# Altium footprint library MTS-103.PcbLib: 1 footprints
Each footprint in its own frame and in the unit in brackets; x right, y up, seen from the top. Pads: shape width x height; smd on the part's side, far side on the other; paste and mask are expansions set on the pad; w line width, h text height; cw(c..) or ccw(c..) is an arc to the next point about the centre after c.
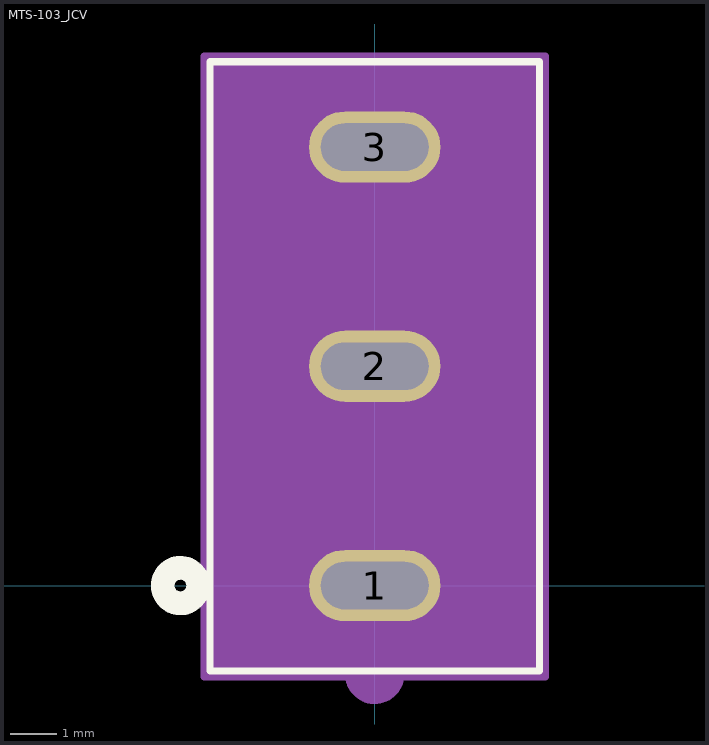
[diagram p0: the footprint, top view; thin cyan lines are the x and y axes]

## MTS-103_JCV [mil]
pads (3):
  oval 111x60 hole 40 slot 91 at 0 deg paste+0 mask+0: 1(0,0) 2(0,185.04) 3(0,370.08)
Top Overlay:
  circle w20: c-164,0 r15
  lines w6: -139,-71.96 139,-71.96 139,442.04 -139,442.04 -139,-71.96
  text ".Designator" at -137.5,160.04 h50
Bottom Overlay:
  circle w20: c-164,0 r15
Mechanical 13:
  circle w20: c0,-75 r15
  lines w1: -134,-66.96 134,-66.96 134,437.04 -134,437.04 -134,-66.96
  text ".Designator" at -137.5,160.04 h50
Mechanical 15:
  region: 144,447.04 -144,447.04 -144,-76.96 144,-76.96
  lines w6: -144,-76.96 -144,447.04 144,447.04 144,-76.96 -144,-76.96